# Altium footprint library Connectors.PcbLib: 319 footprints (part 20 of 20)
Each footprint in its own frame and in the unit in brackets; x right, y up, seen from the top. Pads: shape width x height; smd on the part's side, far side on the other; paste and mask are expansions set on the pad; w line width, h text height; cw(c..) or ccw(c..) is an arc to the next point about the centre after c.
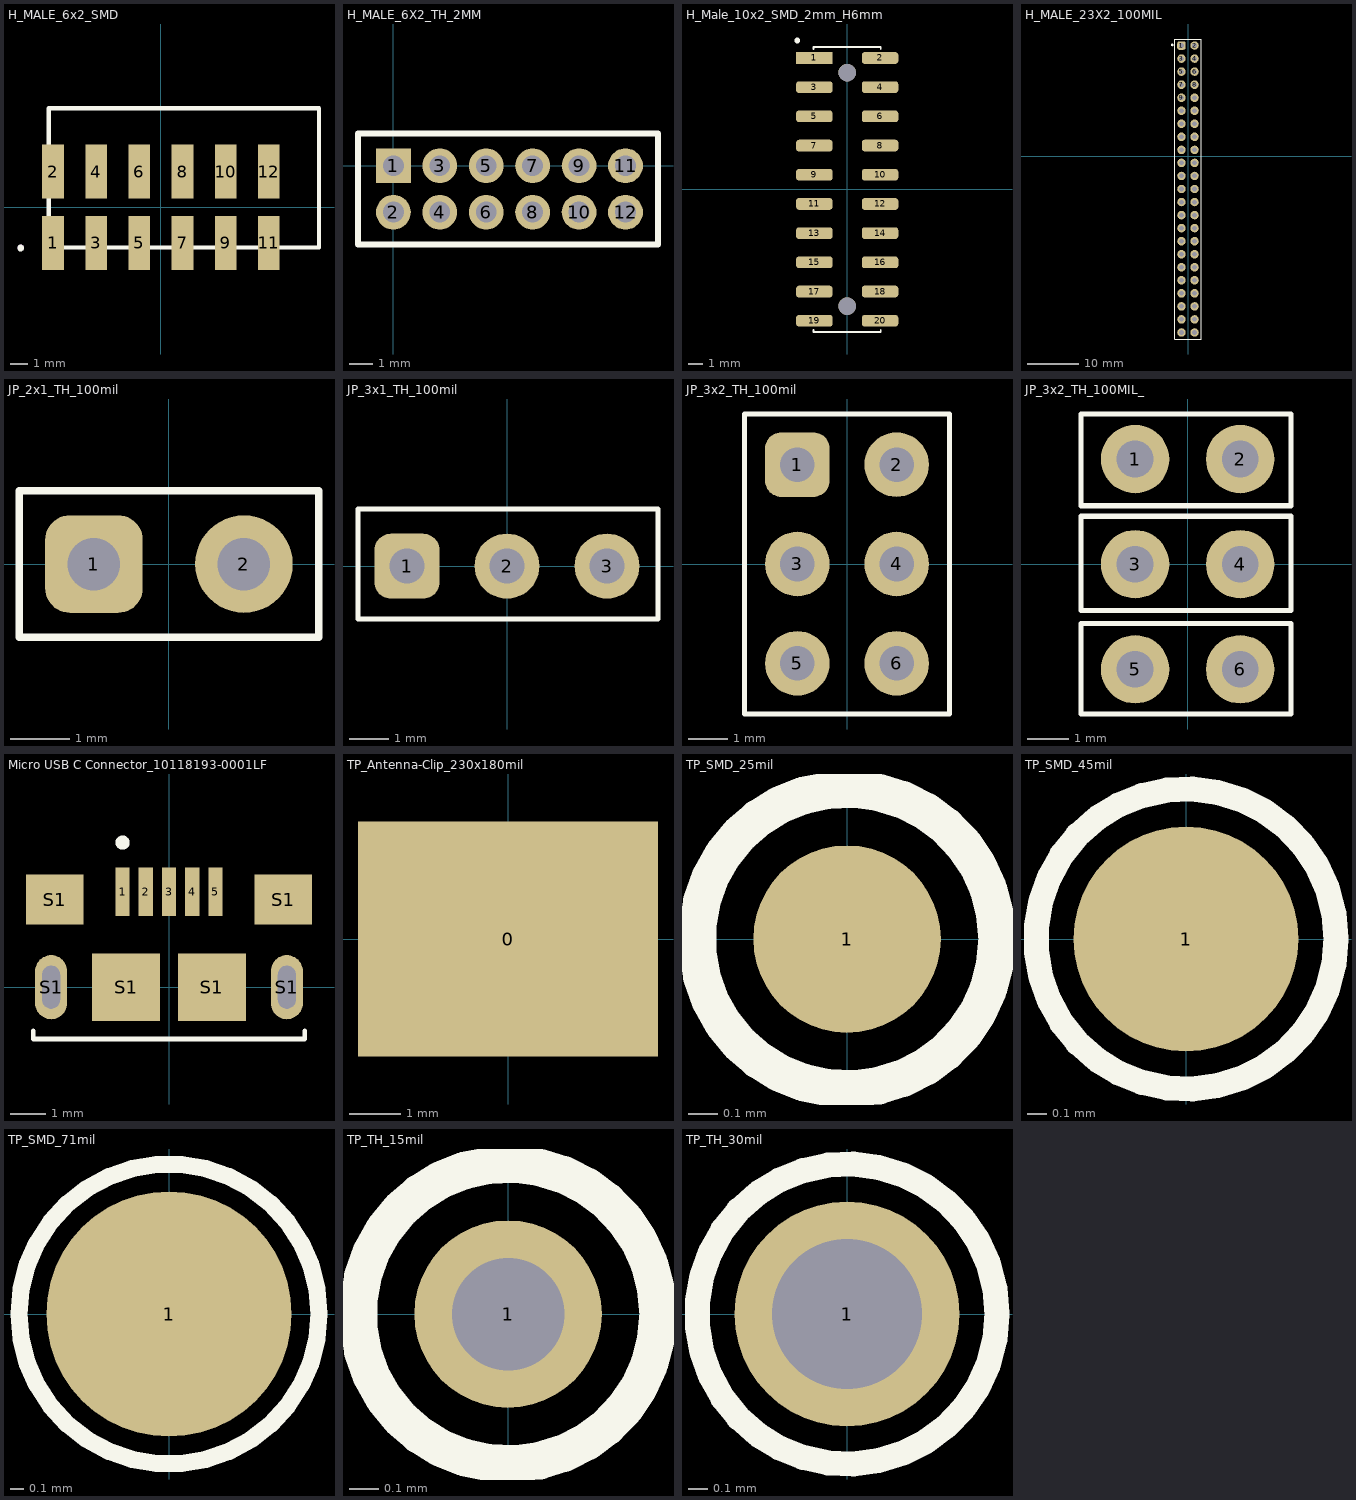
[diagram p19: the footprints below, top view; thin cyan lines are the x and y axes]

## H_MALE_6x2_SMD [mm] "/20221116/J.Jaramillo"
pads (12):
  rect 1.27x3.18 smd: 1(-6.35,-2.095) 2(-6.35,2.095) 3(-3.81,-2.095) 4(-3.81,2.095) 5(-1.27,-2.095) 6(-1.27,2.095) 7(1.27,-2.095) 8(1.27,2.095) 9(3.81,-2.095) 10(3.81,2.095) 11(6.35,-2.095) 12(6.35,2.095)
Top Overlay:
  circle w0.2: c-8.251,-2.401 r0.1
  lines w0.254: -6.601,-2.368 9.299,-2.368 9.299,5.832 -6.601,5.832 -6.601,-2.368
Top 3D Body (Mech13):
  lines w0.2: -8.351,-2.401 cw(c-8.251,-2.401) -8.153,-2.423
3D body "TSM-106-01-T-DH.stp": height 6.11, standoff 0.01, extent -7.619,-12.734 7.621,3.522

## H_MALE_6X2_TH_2MM [mm] "20230627 / E.Naranjo"
pads (12):
  rect 1.5x1.5 hole 0.9: 1(0,0)
  round 1.5 hole 0.9: 2(0,-2) 3(2,0) 4(2,-2) 5(4,0) 6(4,-2) 7(6,0) 8(6,-2) 9(8,0) 10(8,-2) 11(10,0) 12(10,-2)
Top Overlay:
  lines w0.254: -1.524,-1.905 -1.524,1.397 11.4,1.397 11.4,-3.4 -1.524,-3.4 -1.524,-0.635
3D body "10075024g0106ulf.stp": height 5.51, standoff -1.99, extent -1,-3 11,1

## H_Male_10x2_SMD_2mm_H6mm [mm] "/20230621/J-A.Sepulveda"
pads (22):
  rect 2.5x0.8 smd: 1(-2.25,9)
  rrect50% 2.5x0.8 smd: 2(2.25,9) 3(-2.25,7) 4(2.25,7) 5(-2.25,5) 6(2.25,5) 7(-2.25,3) 8(2.25,3) 9(-2.25,1) 10(2.25,1) 11(-2.25,-1) 12(2.25,-1) 13(-2.25,-3) 14(2.25,-3) 15(-2.25,-5) 16(2.25,-5) 17(-2.25,-7) 18(2.25,-7) 19(-2.25,-9) 20(2.25,-9)
  round 1.2 hole 1.2 unplated: ""(0,-8) ""(0,8)
Top Overlay:
  circle w0.2: c-3.425,10.2 r0.1
  lines w0.127: -2.3,-9.62 -2.3,-9.76 2.3,-9.76 2.3,-9.62 ; -2.3,9.62 -2.3,9.76 2.3,9.76 2.3,9.62
3D body "PH2.0x1.5-2x10T B3.9 W6.5 E2.1.stp": height 6.02, standoff -1.34, extent -3.25,-10 3.25,10

## H_MALE_23X2_100MIL [mil] "/20240322/ J.Jaramillo"
pads (47):
  rrect50% 65x65 hole 35: 1(-50,849.99)
  round 65 hole 35: 2(50,849.99) 3(-50,749.99) 4(50,749.99) 5(-50,649.99) 6(50,649.99) 7(-50,549.99) 8(50,549.99) 9(-50,449.99) 10(50,449.99) 11(-50,349.99) 12(50,349.99) 13(-50,249.99) 14(50,249.99) 15(-50,149.99) 16(50,149.99) 17(-50,49.99) 18(50,49.99) 19(-50,-50.01) 20(50,-50.01) 21(-50,-150.01) 22(50,-150.01) 23(-50,-250.01) 24(50,-250.01) 25(-50.01,-350.01) 26(49.99,-350.01) 27(-50.01,-450.01) 28(49.99,-450.01) 29(-50.01,-550.01) 30(49.99,-550.01) 31(-50.01,-650.01) 32(49.99,-650.01) 33(-50.01,-750.01) 34(49.99,-750.01) 35(-50.01,-850.01) 36(49.99,-850.01) 37(-50.01,-950.01) 38(49.99,-950.01) 39(-50.01,-1050.01) 40(49.99,-1050.01) 41(-50.01,-1150.01) 42(49.99,-1150.01) 43(-50.01,-1250.01) 44(49.99,-1250.01) 45(-50.01,-1350.01) 46(49.99,-1350.01)
  round 20 on Top Overlay: ""(-120.82,854.41)
Top Overlay:
  lines w5: -100,-1400 -100,900 100,900 100,-1400 -100,-1400
3D body "PREC023DFAN-RC.STEP": height 96.46, standoff -439.35, extent -100,-1400 100,900

## JP_2x1_TH_100mil [mil] "/ 20190222 / C-A.Serna.A"
pads (2):
  rrect50% 65x65 hole 35: 1(-50,0)
  round 65 hole 35: 2(50,0)
Top Overlay:
  lines w5: -99.99,-48.99 -99.99,49.01 100.01,49.01 100.01,-48.99 -99.99,-48.99
3D body "H_2pos_2.54mm_022284020.stp": height 330.6, standoff -124.4, extent -99.99,-48.99 100.01,49.01
3D body "jumper 2_54mm.step": height 327.24, standoff 91.02, extent -98.42,-47.24 98.43,47.25

## JP_3x1_TH_100mil [mil] "/ 20190222 / C-A.Serna.A"
pads (3):
  rrect50% 65x65 hole 35: 1(-100,0)
  round 65 hole 35: 2(0,0) 3(100,0)
Top Overlay:
  lines w5: -149,-53 -149,57.23 151,57.23 151,-53 -149,-53
3D body "jumper 2_54mm.step": height 327.24, standoff 91.02, extent -144.42,-45.24 52.43,49.25
3D body "Header_3pos_unshrouded.STEP": height 335.25, standoff -117.51, extent -149,-53 151,57.23

## JP_3x2_TH_100mil [mil] "/ 20190411 / C-D Viveros"
pads (6):
  rrect50% 65x65 hole 35: 1(-50,100)
  round 65 hole 35: 2(50,100) 3(-50,0) 4(50,0) 5(-50,-100) 6(50,-100)
Top Overlay:
  lines w5: -103,-151 -103,151 103,151 103,-151 -103,-151
3D body "MNT-102-BK-G.stp": height 350.39, standoff 110.39, extent -100,-56.69 100,143.31
3D body "XG8T-0631.STEP": height 276.1, standoff -117.61, extent -98.42,-152.36 98.43,147.64

## JP_3x2_TH_100MIL_ [mil] "/ 20210215 / M-C.Calderon"
pads (6):
  round 65 hole 35: 1(-50,100) 2(50,100) 3(-50,0) 4(50,0) 5(-50,-100) 6(50,-100)
Top Overlay:
  lines w5: -101.57,-142.52 98.43,-142.52 98.43,-56.33 -101.57,-56.33 -101.57,-142.52 ; -101.57,-44.09 98.43,-44.09 98.43,45.67 -101.57,45.67 -101.57,-44.09 ; -101.57,55.51 98.43,55.51 98.43,142.91 -101.57,142.91 -101.57,55.51

## Micro USB C Connector_10118193-0001LF [mm] "/20240316/J.Jaramillo"
pads (11):
  rect 0.4x1.35 smd: 1(-1.3,2.675) 2(-0.65,2.675) 3(0,2.675) 4(0.65,2.675) 5(1.3,2.675)
  oval 0.9x1.8 hole 0.5 slot 1.2 at 90 deg: S1(-3.3,0) S1(3.3,0)
  rect 1.6x1.4 smd: S1(-3.2,2.45) S1(3.2,2.45)
  rect 1.9x1.9 smd: S1(-1.2,0) S1(1.2,0)
Top Overlay:
  circle w0.2: c-1.3,4.05 r0.1
  lines w0.127: -3.8,-1.22 -3.8,-1.45 3.8,-1.45 3.8,-1.22
3D body "10118193-0001LF--3DModel-STEP-56544.STEP": height 2.85, standoff -0.75, extent -3.93,-2.794 3.93,2.916

## TP_Antenna-Clip_230x180mil [mil] "/ 20200722 / C-D Viveros"
pads (1):
  rect 230x180 smd: 0(0,0)
3D body "s8111-46r.stp": height 81.21, standoff 0.5, extent -100.39,-99.41 96.46,101.38

## TP_SMD_25mil [mm] "/ 20191219 / M-X.Arias"
pads (1):
  round 0.635 smd paste-0.508: 1(0,0)
Top Overlay:
  circle w0.127: c0,0 r0.508

## TP_SMD_45mil [mil] "/ 20191219 / M-X.Arias"
pads (1):
  round 45 smd paste-30: 1(0,0)
Top Overlay:
  circle w5: c0,0 r30

## TP_SMD_71mil [mm] "/ 20220808/ J-E.Pachon"
pads (1):
  round 1.8 smd paste-0.762: 1(0,0)
Top Overlay:
  circle w0.127: c0,0 r1.1

## TP_TH_15mil [mil] "/ 20190222 / C-A.Serna.A"
pads (1):
  round 25 hole 15: 1(0,0)
Top Overlay:
  circle w5: c0,0 r20
Bottom Overlay:
  circle w5: c0,0 r20

## TP_TH_30mil [mil] "/ 20190222 / C-A.Serna.A"
pads (1):
  round 45 hole 30: 1(0,0)
Top Overlay:
  circle w5: c0,0 r30
Bottom Overlay:
  circle w5: c0,0 r30